# Altium footprint library amirlib.PcbLib: 456 footprints (part 9 of 29)
Each footprint in its own frame and in the unit in brackets; x right, y up, seen from the top. Pads: shape width x height; smd on the part's side, far side on the other; paste and mask are expansions set on the pad; w line width, h text height; cw(c..) or ccw(c..) is an arc to the next point about the centre after c.
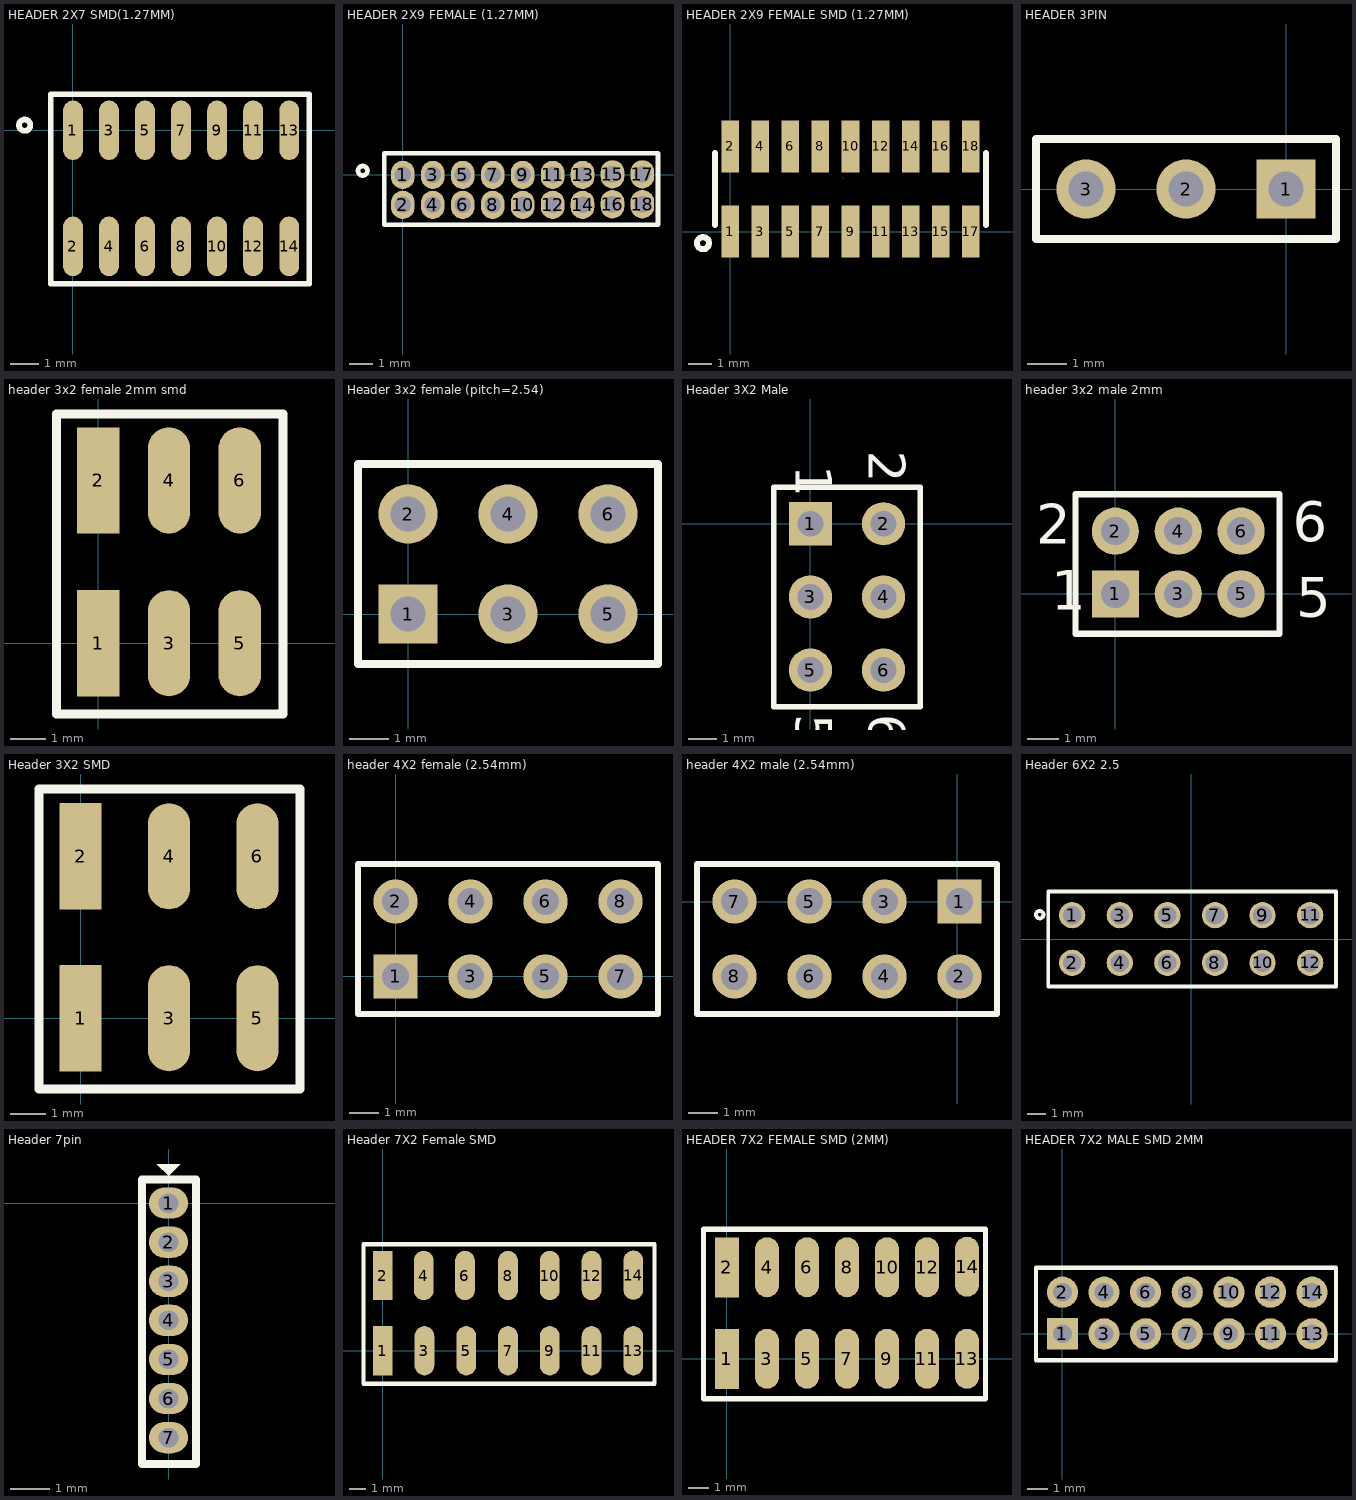
[diagram p8: the footprints below, top view; thin cyan lines are the x and y axes]

## HEADER 2X7 SMD(1.27MM) [mm]
pads (14):
  oval 0.7x2.1 smd: 1(0,0) 2(0,-4.089) 3(1.27,0) 4(1.27,-4.089) 5(2.54,0) 6(2.54,-4.089) 7(3.81,0) 8(3.81,-4.089) 9(5.08,0) 10(5.08,-4.089) 11(6.35,0) 12(6.35,-4.089) 13(7.62,0) 14(7.62,-4.089)
Top Overlay:
  circle w0.2: c-1.702,0.178 r0.2
  lines w0.2: -0.787,-5.41 8.331,-5.41 8.331,1.27 -0.787,1.27 -0.787,-5.41
3D body "14PIN.stp": height 8.2, standoff 0, extent -0.66,-4.757 8.23,0.743

## HEADER 2X9 FEMALE (1.27MM) [mm]
pads (18):
  oval 1x1.2 hole 0.7: 1(0,0) 2(0,-1.27) 3(1.27,0) 4(1.27,-1.27) 5(2.54,0) 6(2.54,-1.27) 7(3.81,0) 8(3.81,-1.27) 9(5.08,0) 10(5.08,-1.27) 11(6.35,0) 12(6.35,-1.27) 13(7.62,0) 14(7.62,-1.27) 15(8.89,0.025) 16(8.89,-1.245) 17(10.16,0.025) 18(10.16,-1.245)
Top Overlay:
  circle w0.2: c-1.702,0.178 r0.2
  lines w0.2: -0.787,0.892 -0.787,-2.108 10.82,-2.108 10.82,0.914 -0.787,0.914
3D body: height 4.3, standoff 0.3, extent -0.737,-2.007 10.82,0.889

## HEADER 2X9 FEMALE SMD (1.27MM) [mm]
pads (18):
  rect 0.74x2.2 smd paste+0 mask+0.051: 1(0,0) 2(0,3.6) 3(1.27,0) 4(1.27,3.6) 5(2.54,0) 6(2.54,3.6) 7(3.81,0) 8(3.81,3.6) 9(5.08,0) 10(5.08,3.6) 11(6.35,0) 12(6.35,3.6) 13(7.62,0) 14(7.62,3.6) 15(8.89,0) 16(8.89,3.6) 17(10.16,0) 18(10.16,3.6)
Top Overlay:
  circle w0.254: c-1.143,-0.486 r0.254
  lines w0.254: -0.635,0.276 -0.635,3.324 ; 10.795,0.276 10.795,3.324
Mechanical 15:
  lines w0.003: 4.762,2.269 4.763,2.27
3D body: height 4.3, standoff 0.3, extent -0.635,0.254 10.795,3.327

## HEADER 3PIN [mm]
pads (3):
  rect 1.5x1.5 hole 0.9: 1(0,0)
  round 1.5 hole 0.9: 2(-2.54,0) 3(-5.08,0)
Top Overlay:
  lines w0.2: -6.35,-1.27 -6.35,1.27 1.27,1.27 1.27,-1.27 -6.35,-1.27

## header 3x2 female 2mm smd [mm]
pads (6):
  rect 1.2x3 smd: 1(0,0) 2(0,4.6)
  oval 1.2x3 smd: 3(2,0) 4(2,4.6) 5(4,0) 6(4,4.6)
Top Overlay:
  lines w0.254: -1.175,-2 5.225,-2 5.225,6.475 -1.175,6.475 -1.175,-2
3D body: height 4.3, standoff 0.3, extent -1.175,0 5.225,4.575

## Header 3x2 female (pitch=2.54) [mm]
pads (6):
  rect 1.5x1.5 hole 0.9: 1(0,0)
  round 1.5 hole 0.9: 2(0,2.54) 3(2.54,0) 4(2.54,2.54) 5(5.08,0) 6(5.08,2.54)
Top Overlay:
  lines w0.2: 1.482,-1.27 6.35,-1.27 ; 6.35,-1.27 6.35,3.81 -1.27,3.81 -1.27,-1.27 6.35,-1.27
3D body "User Library-Header 3X2_254MM.STEP": height 8.53, standoff -3.17, extent -1.279,-1.27 6.359,3.81

## Header 3X2 Male [mm]
pads (6):
  rect 1.5x1.5 hole 0.9: 1(0,0)
  round 1.5 hole 0.9: 2(2.54,0) 3(0,-2.54) 4(2.54,-2.54) 5(0,-5.08) 6(2.54,-5.08)
Top Overlay:
  lines w0.2: -1.27,-1.482 -1.27,-6.35 ; -1.27,-6.35 -1.27,1.27 3.81,1.27 3.81,-6.35 -1.27,-6.35
  text "1" at -0.508,2.032 h1.27
  text "2" at 2.032,2.54 h1.27
  text "5" at -0.508,-6.604 h1.27
  text "6" at 2.032,-6.604 h1.27
3D body "User Library-2x3 Header.STEP": height 8.5, standoff -3, extent -1.23,-6.35 3.81,1.27

## header 3x2 male 2mm [mm]
pads (6):
  rect 1.5x1.5 hole 0.9: 1(0,0)
  round 1.5 hole 0.9: 2(0,2) 3(2,0) 4(2,2) 5(4,0) 6(4,2)
Top Overlay:
  lines w0.2: 1.482,-1.27 5.225,-1.27 ; -1.27,-1.27 -1.27,3.175 5.225,3.175 5.225,-1.25 5.205,-1.27 -1.27,-1.27
  text "1" at -2.032,-0.508 h1.27
  text "2" at -2.525,1.6 h1.27
  text "5" at 5.75,-0.725 h1.27
  text "6" at 5.65,1.675 h1.27

## Header 3X2 SMD [mm]
pads (6):
  rect 1.2x3 smd: 1(0,0) 2(0,4.575)
  oval 1.2x3 smd: 3(2.5,0) 4(2.5,4.575) 5(5,0) 6(5,4.575)
Top Overlay:
  lines w0.254: -1.175,-2 6.2,-2 6.2,6.475 -1.175,6.475 -1.175,-2
3D body: height 4.3, standoff 0.3, extent -1.175,0 6.2,4.575

## header 4X2 female (2.54mm) [mm]
pads (8):
  rect 1.5x1.5 hole 0.9: 1(0,0)
  round 1.5 hole 0.9: 2(0,2.54) 3(2.54,0) 4(2.54,2.54) 5(5.08,0) 6(5.08,2.54) 7(7.62,0) 8(7.62,2.54)
Top Overlay:
  lines w0.2: -1.27,-1.27 -1.27,3.81 8.89,3.81 8.89,-1.27 -1.27,-1.27
3D body "User Library-2x4 female header 2_54mm pitch.STEP": height 4.5, standoff -3.15, extent -1.33,-1.2 8.83,3.88

## header 4X2 male (2.54mm) [mm]
pads (8):
  rect 1.5x1.5 hole 0.9: 1(0.075,0)
  round 1.5 hole 0.9: 2(0.075,-2.54) 3(-2.465,0) 4(-2.465,-2.54) 5(-5.005,0) 6(-5.005,-2.54) 7(-7.545,0) 8(-7.545,-2.54)
Top Overlay:
  lines w0.2: -8.815,-3.81 1.345,-3.81 1.345,1.27 -8.815,1.27 -8.815,-3.81
3D body "User Library-2_54mm Male Header (4x2).STEP": height 8.64, standoff -2.9, extent -8.815,-3.76 1.345,1.22

## Header 6X2 2.5 [mm]
pads (12):
  round 1.4 / inner round 1.4 / far side oval 1.4x2.2 hole 1: 1(-6.35,1.27) 2(-6.35,-1.27) 3(-3.81,1.27) 4(-3.81,-1.27) 5(-1.27,1.27) 6(-1.27,-1.27) 7(1.27,1.27) 8(1.27,-1.27) 9(3.81,1.27) 10(3.81,-1.27) 11(6.35,1.27) 12(6.35,-1.27)
Top Overlay:
  circle w0.2: c-8.08,1.3 r0.2
  lines w0.2: -7.62,-2.54 -7.62,2.54 7.73,2.54 7.73,-2.54 -7.62,-2.54
3D body "PBD-2.stp": height 8.5, standoff -3.15, extent 2.54,-2.54 5.08,2.54
3D body "PBD-2.stp": height 8.5, standoff -3.15, extent -2.54,-2.54 0,2.54
3D body "PBD-2.stp": height 8.5, standoff -3.15, extent 0,-2.54 2.54,2.54
3D body "PBD-2.stp": height 8.5, standoff -3.15, extent -7.62,-2.54 -5.08,2.54
3D body "PBD-2.stp": height 8.5, standoff -3.15, extent -5.08,-2.54 -2.54,2.54
3D body "PBD-2.stp": height 8.5, standoff -3.15, extent 5.101,-2.54 7.641,2.54

## Header 7pin [mm]
pads (7):
  oval 1x0.8 hole 0.5 mask+0.05: 1(0,0) 2(0,-1) 3(0,-2) 4(0,-3) 5(0,-4) 6(0,-5) 7(0,-6)
Top Overlay:
  region: 0,0.7 0.3,1 -0.3,1
  lines w0.2: -0.675,-6.675 -0.675,0.6 0.7,0.6 0.7,-6.675 -0.675,-6.675

## Header 7X2 Female SMD [mm]
pads (14):
  rect 1.2x3 smd: 1(0,0) 2(0,4.575)
  oval 1.2x3 smd: 3(2.54,0) 4(2.5,4.575) 5(5.08,0) 6(5,4.575) 7(7.62,0) 8(7.62,4.575) 9(10.16,0) 10(10.16,4.575) 11(12.7,0) 12(12.7,4.575) 13(15.24,0) 14(15.24,4.6)
Top Overlay:
  lines w0.254: -1.175,-2 16.525,-2 16.525,6.475 -1.175,6.475 -1.175,-2
3D body: height 4.3, standoff 0.3, extent -1.175,0 16.525,4.575

## HEADER 7X2 FEMALE SMD (2MM) [mm]
pads (14):
  rect 1.2x3 smd: 1(0,0) 2(0,4.575)
  oval 1.2x3 smd: 3(2,0) 4(2,4.575) 5(4,0) 6(4,4.575) 7(6,0) 8(6,4.575) 9(8,0) 10(8,4.575) 11(10,0) 12(10,4.575) 13(12,0) 14(12,4.6)
Top Overlay:
  lines w0.254: -1.175,-2 12.925,-2 12.925,6.475 -1.175,6.475 -1.175,-2
3D body: height 4.3, standoff 0.3, extent -1.175,0 12.75,4.575

## HEADER 7X2 MALE SMD 2MM [mm]
pads (14):
  rect 1.5x1.5 hole 0.9: 1(0,0)
  round 1.5 hole 0.9: 2(0,2) 3(2,0) 4(2,2) 5(4,0) 6(4,2) 7(6,0) 8(6,2) 9(8,0) 10(8,2) 11(10,0) 12(10,2) 13(12,0) 14(12,2)
Top Overlay:
  lines w0.2: 1.482,-1.27 5.225,-1.27 ; -1.27,-1.27 -1.27,3.175 13.15,3.175 13.15,-1.27 -1.27,-1.27